# Altium footprint library 54602908LF.PcbLib: 1 footprints
Each footprint in its own frame and in the unit in brackets; x right, y up, seen from the top. Pads: shape width x height; smd on the part's side, far side on the other; paste and mask are expansions set on the pad; w line width, h text height; cw(c..) or ccw(c..) is an arc to the next point about the centre after c.
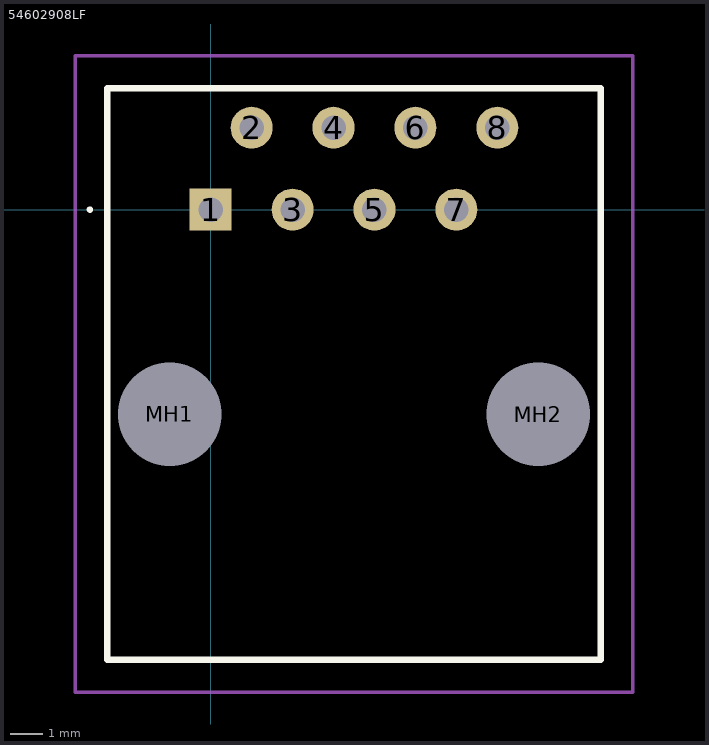
[diagram p0: the footprint, top view; thin cyan lines are the x and y axes]

## 54602908LF [mm]
pads (10):
  rect 1.303x1.303 hole 0.76: 1(0,0)
  round 1.303 hole 0.76: 2(1.27,2.54) 3(2.54,0) 4(3.81,2.54) 5(5.08,0) 6(6.35,2.54) 7(7.62,0) 8(8.89,2.54)
  round 1.6 hole 3.2 unplated: MH1(-1.27,-6.35) MH2(10.16,-6.35)
Top Overlay:
  lines w0.1: -3.8,0 -3.8,0 ; -3.8,0 ccw(c-3.75,0) -3.7,0 ; -3.8,0 cw(c-3.75,0) -3.7,0 ; -3.7,0 -3.7,0
  lines w0.2: -3.205,-13.97 12.095,-13.97 12.095,3.77 -3.205,3.77 -3.205,-13.97
Mechanical 15:
  lines w0.1: -3.205,-13.97 12.095,-13.97 12.095,3.77 -3.205,3.77 -3.205,-13.97
Mechanical 20:
  lines w0.1: -4.205,-14.97 13.095,-14.97 13.095,4.77 -4.205,4.77 -4.205,-14.97